# Altium footprint library PicoHAT.PcbLib: 1 footprints
Each footprint in its own frame and in the unit in brackets; x right, y up, seen from the top. Pads: shape width x height; smd on the part's side, far side on the other; paste and mask are expansions set on the pad; w line width, h text height; cw(c..) or ccw(c..) is an arc to the next point about the centre after c.
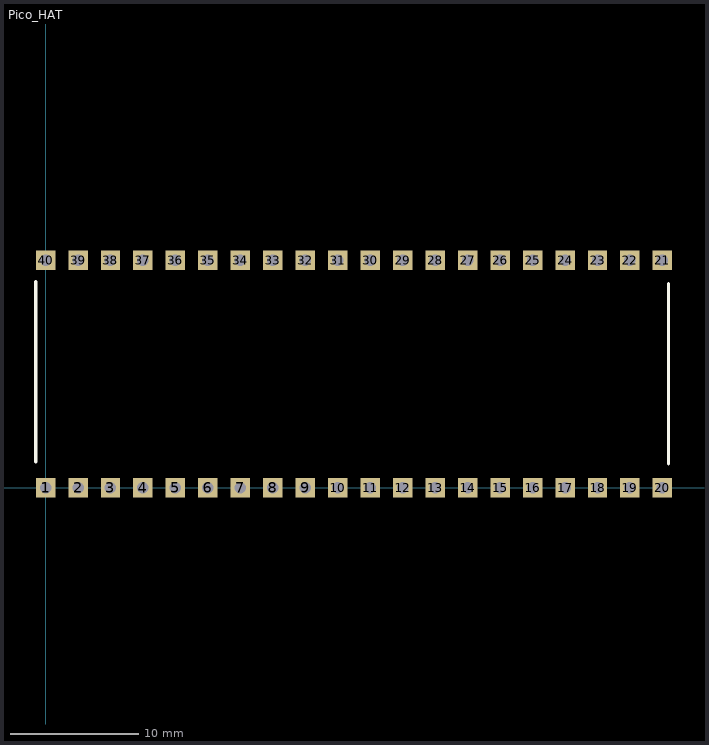
[diagram p0: the footprint, top view; thin cyan lines are the x and y axes]

## Pico_HAT [mil]
pads (40):
  rect 60x60 hole 35.43: 1(0,0) 2(100,0) 3(200,0) 4(300,0) 5(400,0) 6(500,0) 7(600,0) 8(700,0) 9(800,0) 10(900,0) 11(1000,0) 12(1100,0) 13(1200,0) 14(1300,0) 15(1400,0) 16(1500,0) 17(1600,0) 18(1700,0) 19(1800,0) 20(1900,0) 21(1900,700) 22(1800,700) 23(1700,700) 24(1600,700) 25(1500,700) 26(1400,700) 27(1300,700) 28(1200,700) 29(1100,700) 30(1000,700) 31(900,700) 32(800,700) 33(700,700) 34(600,700) 35(500,700) 36(400,700) 37(300,700) 38(200,700) 39(100,700) 40(0,700)
Top Overlay:
  lines w10: -30,80 -30,635 ; 1918.83,73.58 1918.83,628.58